# EAGLE library part SN74LVC2G14DBVR (library SN74LVC2G14DBVR)
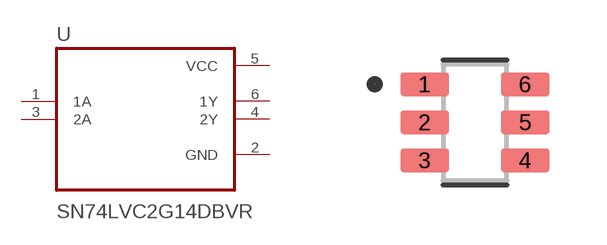
[diagram p0: symbol with the pads of SOT95P280X145-6N; footprint SOT95P280X145-6N]

Designator prefix U

## SN74LVC2G14DBVR (DATASHEET_URL: http://www.ti.com/lit/gpn/sn74lvc2g14; DESCRIPTION: Two-channel 1.65V-to-5.5V inverters with Schmitt-Trigger inputs; MANUFACTURER: Texas Instruments; MPN: SN74LVC2G14DBVR; SOURCE_URL: https://www.snapeda.com/parts/SN74LVC2G14DBVR/Texas+Instruments/view-part/)  [SOT95P280X145-6N]
1  1A  in
2  GND  pwr
3  2A  in
4  2Y  out
5  VCC  pwr
6  1Y  out

## Footprint SOT95P280X145-6N (pad centres in mm)
smd 1.21 x 0.58: 1 -1.255,0.95; 2 -1.255,0; 3 -1.255,-0.95; 4 1.255,-0.95; 5 1.255,0; 6 1.255,0.95